# Altium footprint library BS_RFE_BB_20230506.PcbLib: 77 footprints (part 3 of 5)
Each footprint in its own frame and in the unit in brackets; x right, y up, seen from the top. Pads: shape width x height; smd on the part's side, far side on the other; paste and mask are expansions set on the pad; w line width, h text height; cw(c..) or ccw(c..) is an arc to the next point about the centre after c.
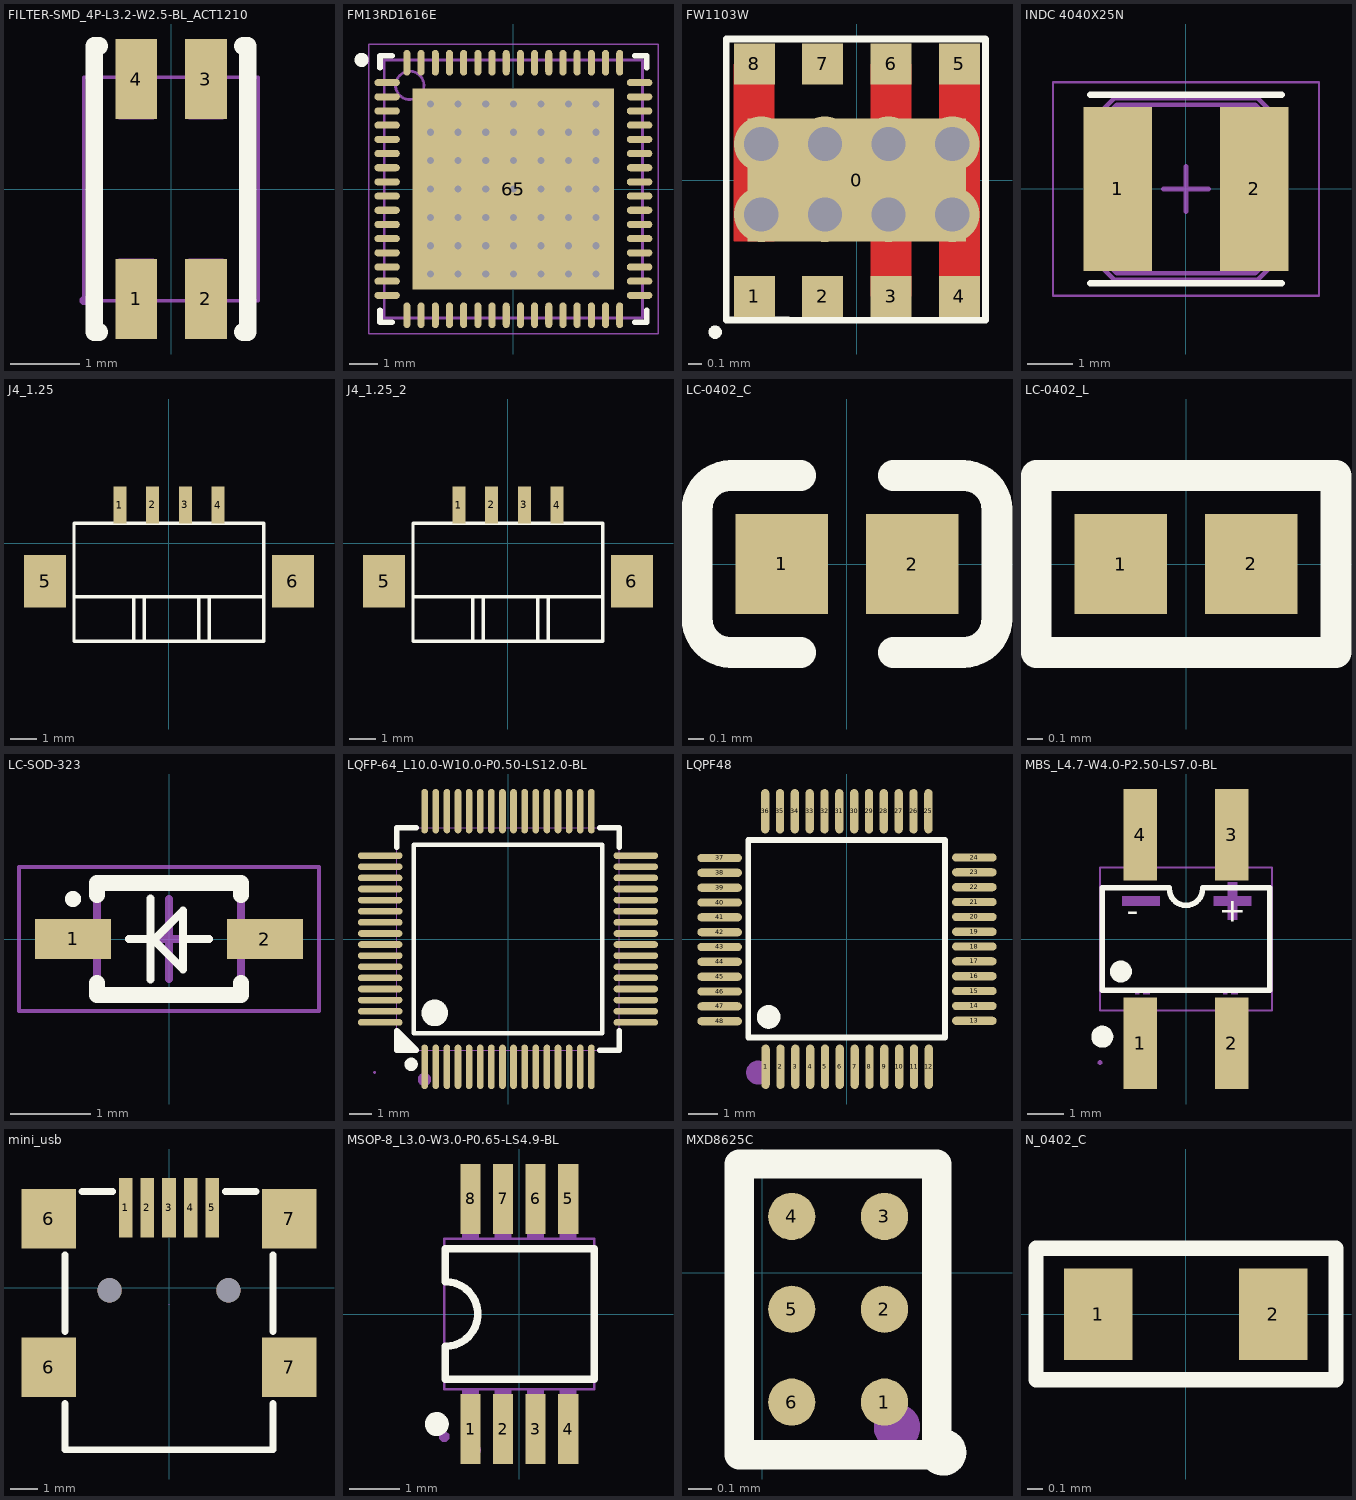
[diagram p2: the footprints below, top view; thin cyan lines are the x and y axes]

## FILTER-SMD_4P-L3.2-W2.5-BL_ACT1210 [mm]
pads (4):
  rect 0.6x1.15 smd paste+0 mask+0.051: 1(-0.5,-1.575) 2(0.5,-1.575) 3(0.5,1.575) 4(-0.5,1.575)
Top Overlay:
  lines w0.254: -1.031,-2.05 -1.1,-2.05 -1.1,2.05 -1.031,2.05 ; 1.031,-2.05 1.1,-2.05 1.1,2.05 1.031,2.05
Mechanical 15:
  region: -0.25,1 -0.75,1 -0.75,1.6 -0.25,1.6
  region: 0.75,1 0.25,1 0.25,1.6 0.75,1.6
  region: 0.75,-1.6 0.25,-1.6 0.25,-1 0.75,-1
  region: -0.25,-1.6 -0.75,-1.6 -0.75,-1 -0.25,-1
  region: -1.19,-1.6 -1.19,-1.575 -1.225,-1.54 -1.275,-1.54 -1.31,-1.575 -1.31,-1.6 -1.31,-1.625 -1.275,-1.66 -1.225,-1.66 -1.19,-1.625 -1.19,-1.6
  lines w0.051: -1.25,-1.6 -1.25,1.6 1.25,1.6 1.25,-1.6 -1.25,-1.6

## FM13RD1616E [mm]
pads (65):
  oval 0.9x0.25 smd: 1(-4.45,3.75) 2(-4.45,3.25) 3(-4.45,2.75) 4(-4.45,2.25) 5(-4.45,1.75) 6(-4.45,1.25) 7(-4.45,0.75) 8(-4.45,0.25) 9(-4.45,-0.25) 10(-4.45,-0.75) 11(-4.45,-1.25) 12(-4.45,-1.75) 13(-4.45,-2.25) 14(-4.45,-2.75) 15(-4.45,-3.25) 16(-4.45,-3.75) 33(4.45,-3.75) 34(4.45,-3.25) 35(4.45,-2.75) 36(4.45,-2.25) 37(4.45,-1.75) 38(4.45,-1.25) 39(4.45,-0.75) 40(4.45,-0.25) 41(4.45,0.25) 42(4.45,0.75) 43(4.45,1.25) 44(4.45,1.75) 45(4.45,2.25) 46(4.45,2.75) 47(4.45,3.25) 48(4.45,3.75)
  oval 0.25x0.9 smd: 17(-3.75,-4.45) 18(-3.25,-4.45) 19(-2.75,-4.45) 20(-2.25,-4.45) 21(-1.75,-4.45) 22(-1.25,-4.45) 23(-0.75,-4.45) 24(-0.25,-4.45) 25(0.25,-4.45) 26(0.75,-4.45) 27(1.25,-4.45) 28(1.75,-4.45) 29(2.25,-4.45) 30(2.75,-4.45) 31(3.25,-4.45) 32(3.75,-4.45) 49(3.75,4.45) 50(3.25,4.45) 51(2.75,4.45) 52(2.25,4.45) 53(1.75,4.45) 54(1.25,4.45) 55(0.75,4.45) 56(0.25,4.45) 57(-0.25,4.45) 58(-0.75,4.45) 59(-1.25,4.45) 60(-1.75,4.45) 61(-2.25,4.45) 62(-2.75,4.45) 63(-3.25,4.45) 64(-3.75,4.45)
  rect 7.1x7.1 smd: 65(0,0)
via 2.919,-3 diameter 0.4 hole 0.25
via 1.946,-3 diameter 0.4 hole 0.25
via -2.919,-3 diameter 0.4 hole 0.25
via -1.946,-3 diameter 0.4 hole 0.25
via -0.973,-3 diameter 0.4 hole 0.25
via 0,-3 diameter 0.4 hole 0.25
via 0.973,-3 diameter 0.4 hole 0.25
via 2.919,-2 diameter 0.4 hole 0.25
via 1.946,-2 diameter 0.4 hole 0.25
via -2.919,-2 diameter 0.4 hole 0.25
via -1.946,-2 diameter 0.4 hole 0.25
via -0.973,-2 diameter 0.4 hole 0.25
via 0,-2 diameter 0.4 hole 0.25
via 0.973,-2 diameter 0.4 hole 0.25
via 2.919,-1 diameter 0.4 hole 0.25
via 1.946,-1 diameter 0.4 hole 0.25
via -2.919,-1 diameter 0.4 hole 0.25
via -1.946,-1 diameter 0.4 hole 0.25
via -0.973,-1 diameter 0.4 hole 0.25
via 0,-1 diameter 0.4 hole 0.25
via 0.973,-1 diameter 0.4 hole 0.25
via 2.919,0 diameter 0.4 hole 0.25
via 1.946,0 diameter 0.4 hole 0.25
via -2.919,0 diameter 0.4 hole 0.25
via -1.946,0 diameter 0.4 hole 0.25
via -0.973,0 diameter 0.4 hole 0.25
via 0,0 diameter 0.4 hole 0.25
via 0.973,0 diameter 0.4 hole 0.25
via 2.919,1 diameter 0.4 hole 0.25
via 1.946,1 diameter 0.4 hole 0.25
via -2.919,1 diameter 0.4 hole 0.25
via -1.946,1 diameter 0.4 hole 0.25
via -0.973,1 diameter 0.4 hole 0.25
via 0,1 diameter 0.4 hole 0.25
via 0.973,1 diameter 0.4 hole 0.25
via 2.919,2 diameter 0.4 hole 0.25
via 1.946,2 diameter 0.4 hole 0.25
via -2.919,2 diameter 0.4 hole 0.25
via -1.946,2 diameter 0.4 hole 0.25
via -0.973,2 diameter 0.4 hole 0.25
via 0,2 diameter 0.4 hole 0.25
via 0.973,2 diameter 0.4 hole 0.25
via 2.919,3 diameter 0.4 hole 0.25
via 1.946,3 diameter 0.4 hole 0.25
via -2.919,3 diameter 0.4 hole 0.25
via -1.946,3 diameter 0.4 hole 0.25
via -0.973,3 diameter 0.4 hole 0.25
via 0,3 diameter 0.4 hole 0.25
via 0.973,3 diameter 0.4 hole 0.25
Top Overlay:
  circle w0.25: c-5.35,4.55 r0.125
  lines w0.2: -4.7,-4.275 -4.7,-4.7 -4.275,-4.7 ; -4.7,4.275 -4.7,4.7 -4.275,4.7 ; 4.275,-4.7 4.7,-4.7 4.7,-4.275 ; 4.275,4.7 4.7,4.7 4.7,4.275
Mechanical 13:
  circle w0.1: c-3.65,3.65 r0.5
  lines w0.1: -4.55,-4.55 -4.55,4.55 4.55,4.55 4.55,-4.55 -4.55,-4.55
Mechanical 15:
  lines w0.05: -5.1,-5.1 -5.1,5.1 5.1,5.1 5.1,-5.1 -5.1,-5.1
  lines w0.1: -0.5,0 0.5,0 ; 0,-0.5 0,0.5
3D body "QFN50P900X900X80_HS-65N.step": height 0.8, standoff 0, extent -4.551,-4.551 4.551,4.551

## FW1103W [mm]
pads (10):
  rect 1.6x0.9 smd mask+0: 0(0,0)
  rect 0.3x0.3 smd mask+0: 1(-0.75,-0.85) 2(-0.25,-0.85) 3(0.25,-0.85) 4(0.75,-0.85) 5(0.75,0.85) 6(0.25,0.85) 7(-0.25,0.85) 8(-0.75,0.85)
  round 0.1 on Top Overlay mask+0: ""(-1.036,-1.113)
via 0.232,-0.252 diameter 0.4 hole 0.25
via -0.699,-0.252 diameter 0.4 hole 0.25
via 0.698,-0.252 diameter 0.4 hole 0.25
via -0.233,-0.252 diameter 0.4 hole 0.25
via 0.232,0.264 diameter 0.4 hole 0.25
via -0.699,0.264 diameter 0.4 hole 0.25
via 0.698,0.264 diameter 0.4 hole 0.25
via -0.233,0.264 diameter 0.4 hole 0.25
Top Layer:
  rectangle: 0.1,-0.85 0.4,0.85
  rectangle: 0.6,-0.85 0.9,0.85
  rectangle: -0.901,-0.45 -0.601,0.85
  rectangle: 0.615,-0.451 0.898,0.451
  rectangle: -0.901,-0.45 -0.618,0.45
Top Overlay:
  lines w0.05: -0.533,-1.025 0.943,-1.025 0.943,1.032 -0.955,1.032 -0.955,-1.024 -0.5,-1.024
Top Paste:
  rectangle: -0.903,-0.451 -0.62,0.449
  rectangle: 0.618,-0.449 0.901,0.451

## INDC 4040X25N [mm]
pads (2):
  rect 1.5x3.6 smd: 1(-1.5,0) 2(1.5,0)
Top Overlay:
  lines w0.15: -2.1,-2.075 2.1,-2.075 ; -2.1,2.075 2.1,2.075
Mechanical 7:
  lines w0.1: -2,-1.575 -2,1.575 -1.575,2 1.575,2 2,1.575 2,-1.575 1.575,-2 -1.575,-2 -2,-1.575 ; -1.85,-1.525 -1.525,-1.85 1.525,-1.85 1.85,-1.525 1.85,1.525 1.525,1.85 -1.525,1.85 -1.85,1.525 -1.85,-1.525
Mechanical 15:
  lines w0.05: -2.925,-2.35 -2.925,2.35 2.925,2.35 2.925,-2.35 -2.925,-2.35
  lines w0.1: -0.5,0 0.5,0 ; 0,-0.5 0,0.5
3D body "SRN4026 Series.stp": height 2.1, standoff -0.05, extent -1.951,-1.956 1.951,1.955

## J4_1.25 [mm]
pads (6):
  rect 0.5x1.4 smd: 1(-1.875,1.45) 2(-0.625,1.45) 3(0.625,1.45) 4(1.875,1.45)
  rect 1.6x2 smd: 5(-4.72,-1.45) 6(4.72,-1.45)
Top Overlay:
  lines w0.127: -3.62,-2.05 3.614,-2.05 ; -1.34,-3.736 -1.34,-2.136 ; -0.94,-3.736 -0.94,-2.136 ; 1.14,-3.736 1.14,-2.136 ; 1.54,-3.736 1.54,-2.136 ; -3.62,-3.75 3.614,-3.75 3.614,0.75 -3.62,0.75 -3.62,-3.75

## J4_1.25_2 [mm]
pads (6):
  rect 0.5x1.4 smd: 1(-1.875,1.45) 2(-0.625,1.45) 3(0.625,1.45) 4(1.875,1.45)
  rect 1.6x2 smd: 5(-4.72,-1.45) 6(4.72,-1.45)
Top Overlay:
  lines w0.127: -3.62,-2.05 3.614,-2.05 ; -1.34,-3.736 -1.34,-2.136 ; -0.94,-3.736 -0.94,-2.136 ; 1.14,-3.736 1.14,-2.136 ; 1.54,-3.736 1.54,-2.136 ; -3.62,-3.75 3.614,-3.75 3.614,0.75 -3.62,0.75 -3.62,-3.75

## LC-0402_C [mm]
pads (2):
  rect 0.6x0.65 smd mask+0.051: 1(-0.425,0) 2(0.425,0)
Top Overlay:
  lines w0.2: -0.755,-0.575 cw(c-0.755,-0.355) -0.975,-0.355 -0.975,0.355 cw(c-0.755,0.355) -0.755,0.575 ; -0.75,-0.575 -0.3,-0.575 ; -0.75,0.575 -0.3,0.575 ; 0.3,-0.575 0.75,-0.575 ; 0.3,0.575 0.75,0.575 ; 0.755,-0.575 ccw(c0.755,-0.355) 0.975,-0.355 0.975,0.355 ccw(c0.755,0.355) 0.755,0.575
3D body "0402 SMD Capacitor.step": height 0.2, standoff 0, extent -0.483,-0.3 0.518,0.3

## LC-0402_L [mm]
pads (2):
  rect 0.6x0.65 smd mask+0.051: 1(-0.425,0) 2(0.425,0)
Top Overlay:
  lines w0.2: 0.965,-0.575 -0.975,-0.575 -0.975,0.575 0.965,0.575 ; 0.975,-0.575 0.975,0.575
3D body "User Library-RES_1005-0402.STEP": height 0.41, standoff 0, extent -0.575,-0.275 0.575,0.275

## LC-SOD-323 [mm]
pads (2):
  rect 0.95x0.5 smd: 1(-1.2,0) 2(1.2,0)
Top Overlay:
  circle w0.1: c-1.2,0.5 r0.05
  lines w0.1: -0.5,0 -0.178,0 ; -0.229,-0.508 -0.229,0.508 ; 0.178,0 0.5,0 ; -0.178,0 -0.178,-0.025 0.178,-0.381 0.178,0.356 -0.178,0
  lines w0.2: -0.9,-0.55 -0.9,-0.7 0.9,-0.7 0.9,-0.55 ; -0.9,0.55 -0.9,0.7 0.9,0.7 0.9,0.55
Mechanical 13:
  lines w0.1: -0.9,-0.7 -0.9,0.7 0.9,0.7 0.9,-0.7 -0.9,-0.7
Mechanical 15:
  lines w0.05: -1.875,-0.9 -1.875,0.9 1.875,0.9 1.875,-0.9 -1.875,-0.9
  lines w0.1: -0.5,0 0.5,0 ; 0,-0.5 0,0.5
3D body "User Library-SOD323-1.STEP": height 1.1, standoff 0, extent -1.3,-0.675 1.3,0.675

## LQFP-64_L10.0-W10.0-P0.50-LS12.0-BL [mm]
pads (64):
  oval 0.3x2 smd paste+0 mask+0.051: 1(-3.75,-5.75) 2(-3.25,-5.75) 3(-2.75,-5.75) 4(-2.25,-5.75) 5(-1.75,-5.75) 6(-1.25,-5.75) 7(-0.75,-5.75) 8(-0.25,-5.75) 9(0.25,-5.75) 10(0.75,-5.75) 11(1.25,-5.75) 12(1.75,-5.75) 13(2.25,-5.75) 14(2.75,-5.75) 15(3.25,-5.75) 16(3.75,-5.75) 33(3.75,5.75) 34(3.25,5.75) 35(2.75,5.75) 36(2.25,5.75) 37(1.75,5.75) 38(1.25,5.75) 39(0.75,5.75) 40(0.25,5.75) 41(-0.25,5.75) 42(-0.75,5.75) 43(-1.25,5.75) 44(-1.75,5.75) 45(-2.25,5.75) 46(-2.75,5.75) 47(-3.25,5.75) 48(-3.75,5.75)
  oval 2x0.3 smd paste+0 mask+0.051: 17(5.75,-3.75) 18(5.75,-3.25) 19(5.75,-2.75) 20(5.75,-2.25) 21(5.75,-1.75) 22(5.75,-1.25) 23(5.75,-0.75) 24(5.75,-0.25) 25(5.75,0.25) 26(5.75,0.75) 27(5.75,1.25) 28(5.75,1.75) 29(5.75,2.25) 30(5.75,2.75) 31(5.75,3.25) 32(5.75,3.75) 49(-5.75,3.75) 50(-5.75,3.25) 51(-5.75,2.75) 52(-5.75,2.25) 53(-5.75,1.75) 54(-5.75,1.25) 55(-5.75,0.75) 56(-5.75,0.25) 57(-5.75,-0.25) 58(-5.75,-0.75) 59(-5.75,-1.25) 60(-5.75,-1.75) 61(-5.75,-2.25) 62(-5.75,-2.75) 63(-5.75,-3.25) 64(-5.75,-3.75)
Top Overlay:
  region: -4.131,-5 -5,-4.131 -5,-5
  lines w0.2: -4.25,-4.25 -4.25,4.25 4.25,4.25 4.25,-4.25 -4.25,-4.25
  lines w0.254: -5,4.131 -5,5 -4.131,5 ; 4.131,-5 5,-5 5,-4.131 ; 4.131,5 5,5 5,4.131 ; -5,-4.131 -5,-4.131 ; -5,-4.131 -4.131,-5 -5,-5 -5,-4.131
  lines w0.3: -4.361,-5.49 ccw(c-4.36,-5.64) -4.359,-5.49
  lines w0.6: -3.299,-3.025 ccw(c-3.297,-3.325) -3.294,-3.025
Mechanical 6:
  circle w0.3: c-3.76,-6.32 r0.15
Mechanical 15:
  drawing of 133 lines, arcs and shapes, not listed

## LQPF48 [mm]
pads (48):
  oval 0.28x1.5 smd: 1(-2.743,-4.305) 2(-2.243,-4.305) 3(-1.742,-4.305) 4(-1.242,-4.305) 5(-0.742,-4.305) 6(-0.241,-4.305) 7(0.257,-4.305) 8(0.757,-4.305) 9(1.257,-4.305) 10(1.758,-4.305) 11(2.258,-4.305) 12(2.758,-4.305) 25(2.743,4.305) 26(2.243,4.305) 27(1.742,4.305) 28(1.242,4.305) 29(0.742,4.305) 30(0.241,4.305) 31(-0.257,4.305) 32(-0.757,4.305) 33(-1.257,4.305) 34(-1.758,4.305) 35(-2.258,4.305) 36(-2.758,4.305)
  oval 1.5x0.28 smd: 13(4.293,-2.756) 14(4.293,-2.256) 15(4.293,-1.755) 16(4.293,-1.255) 17(4.293,-0.754) 18(4.293,-0.254) 19(4.293,0.244) 20(4.293,0.744) 21(4.293,1.245) 22(4.293,1.745) 23(4.293,2.245) 24(4.293,2.746) 37(-4.293,2.731) 38(-4.293,2.23) 39(-4.293,1.73) 40(-4.293,1.229) 41(-4.293,0.729) 42(-4.293,0.229) 43(-4.293,-0.269) 44(-4.293,-0.77) 45(-4.293,-1.27) 46(-4.293,-1.77) 47(-4.293,-2.271) 48(-4.293,-2.771)
Top Overlay:
  lines w0.2: -2.896,3.34 3.302,3.34 3.302,-3.315 -3.327,-3.315 -3.327,3.34 -2.565,3.34
  lines w0.4: -2.642,-2.426 ccw(c-2.64,-2.626) -2.639,-2.426
Mechanical 15:
  circle w0.4: c-3,-4.5 r0.2

## MBS_L4.7-W4.0-P2.50-LS7.0-BL [mm]
pads (4):
  rect 0.91x2.495 smd paste+0 mask+0.051: 1(-1.25,-2.848) 2(1.25,-2.848) 3(1.25,2.848) 4(-1.25,2.848)
Top Overlay:
  circle w0.3: c-1.778,-0.889 r0.15
  circle w0.3: c-2.286,-2.667 r0.15
  lines w0.152: -0.457,1.371 ccw(c0,1.375) 0.457,1.371 ; -0.457,1.397 -2.286,1.397 -2.286,-1.397 2.286,-1.397 2.286,1.397 0.457,1.397
  text "+" at 0.889,0.474 h0.65
  text "-" at -1.611,0.474 h0.65
Mechanical 6:
  circle w0.3: c-1.25,-3.775 r0.15
  region: -0.988,-1.361 -0.952,-1.361 -0.952,-1.433 -0.988,-1.433
  region: -1.024,-1.361 -0.988,-1.361 -0.988,-1.505 -1.024,-1.505
  region: -1.06,-1.361 -1.024,-1.361 -1.024,-1.505 -1.06,-1.505
  region: -1.096,-1.433 -1.06,-1.433 -1.06,-1.505 -1.096,-1.505
  region: -1.132,-1.397 -1.096,-1.397 -1.096,-1.505 -1.132,-1.505
  region: -1.168,-1.397 -1.132,-1.397 -1.132,-1.505 -1.168,-1.505
  region: -1.204,-1.361 -1.168,-1.361 -1.168,-1.469 -1.204,-1.469
  region: -1.24,-1.361 -1.204,-1.361 -1.204,-1.469 -1.24,-1.469
  region: -1.276,-1.361 -1.24,-1.361 -1.24,-1.433 -1.276,-1.433
  region: -1.312,-1.361 -1.276,-1.361 -1.276,-1.505 -1.312,-1.505
  region: -1.348,-1.361 -1.312,-1.361 -1.312,-1.505 -1.348,-1.505
  region: -1.384,-1.397 -1.348,-1.397 -1.348,-1.505 -1.384,-1.505
  region: 1.412,-1.361 1.448,-1.361 1.448,-1.433 1.412,-1.433
  region: 1.376,-1.361 1.412,-1.361 1.412,-1.505 1.376,-1.505
  region: 1.34,-1.361 1.376,-1.361 1.376,-1.505 1.34,-1.505
  region: 1.304,-1.433 1.34,-1.433 1.34,-1.505 1.304,-1.505
  region: 1.268,-1.397 1.304,-1.397 1.304,-1.505 1.268,-1.505
  region: 1.232,-1.397 1.268,-1.397 1.268,-1.505 1.232,-1.505
  region: 1.196,-1.361 1.232,-1.361 1.232,-1.469 1.196,-1.469
  region: 1.16,-1.361 1.196,-1.361 1.196,-1.469 1.16,-1.469
  region: 1.124,-1.361 1.16,-1.361 1.16,-1.433 1.124,-1.433
  region: 1.088,-1.361 1.124,-1.361 1.124,-1.505 1.088,-1.505
  region: 1.052,-1.361 1.088,-1.361 1.088,-1.505 1.052,-1.505
  region: 1.016,-1.397 1.052,-1.397 1.052,-1.505 1.016,-1.505
  region: 1.651,0.913 0.762,0.913 0.762,1.167 1.778,1.167 1.778,0.913
  region: 1.397,1.421 1.397,0.532 1.143,0.532 1.143,1.548 1.397,1.548
  region: -0.849,0.913 -1.738,0.913 -1.738,1.167 -0.722,1.167 -0.722,0.913
Mechanical 15:
  region: -2.29,-3.375 -2.29,-3.35 -2.325,-3.315 -2.375,-3.315 -2.41,-3.35 -2.41,-3.375 -2.41,-3.4 -2.375,-3.435 -2.325,-3.435 -2.29,-3.4 -2.29,-3.375
  region: -1.575,-3.375 -1.575,-2.175 -0.925,-2.175 -0.925,-3.375
  region: -1.575,-2.185 -1.575,-1.79 -0.925,-1.79 -0.925,-2.185
  region: 0.925,-3.375 0.925,-2.175 1.575,-2.175 1.575,-3.375
  region: 0.925,-2.185 0.925,-1.79 1.575,-1.79 1.575,-2.185
  region: -1.575,3.375 -1.575,2.175 -0.925,2.175 -0.925,3.375
  region: -1.575,2.185 -1.575,1.79 -0.925,1.79 -0.925,2.185
  region: 0.925,3.375 0.925,2.175 1.575,2.175 1.575,3.375
  region: 0.925,2.185 0.925,1.79 1.575,1.79 1.575,2.185
  lines w0.051: -2.35,-1.95 -2.35,1.95 2.35,1.95 2.35,-1.95 -2.35,-1.95

## mini_usb [mm]
pads (11):
  rect 0.5x2.2 smd: 1(-1.6,2.95) 2(-0.8,2.95) 3(0,2.95) 4(0.8,2.95) 5(1.6,2.95)
  rect 2x2.2 smd: 6(-4.45,-2.95) 6(-4.45,2.55) 7(4.45,-2.95) 7(4.45,2.55)
  round 0.9 hole 0.9 unplated: ""(-2.2,-0.1) ""(2.2,-0.1)
Top Overlay:
  lines w0.254: -3.85,-4.281 -3.85,-6 3.85,-6 3.85,-4.281 ; -3.85,-1.619 -3.85,1.219 ; -3.219,3.556 -2.081,3.556 ; 2.081,3.556 3.219,3.556 ; 3.85,-1.619 3.85,1.219
Mechanical 15:
  lines w0.003: 0,-0.614 0,-0.613

## MSOP-8_L3.0-W3.0-P0.65-LS4.9-BL [mil]
pads (8):
  rect 15.98x55 smd mask+2: 1(-38.39,-90.55) 2(-12.8,-90.55) 3(12.8,-90.55) 4(38.39,-90.55) 5(38.39,90.55) 6(12.8,90.55) 7(-12.8,90.55) 8(-38.39,90.55)
Top Overlay:
  circle w9.45: c-64.96,-86.61 r4.72
  lines w5.91: -58.2,-51.18 -58.2,-25.5 ccw(c-58.2,0) -58.2,25.5 -58.2,51.18 59.05,51.18 59.05,-51.18 -58.2,-51.18
Mechanical 6:
  circle w7.87: c-38.19,-107.09 r3.94
Mechanical 15:
  region: -55.11,-96.46 -55.11,-94.83 -57.42,-92.52 -60.68,-92.52 -62.99,-94.83 -62.99,-96.46 -62.99,-98.09 -60.68,-100.4 -57.42,-100.4 -55.11,-98.09 -55.11,-96.46
  region: 6.4,-71 19.19,-71 19.19,-96.46 6.4,-96.46
  region: 6.42,-58.66 6.42,-72.44 19.17,-72.44 19.17,-58.66
  region: 31.99,-71 44.78,-71 44.78,-96.46 31.99,-96.46
  region: 32.01,-58.66 32.01,-72.44 44.77,-72.44 44.77,-58.66
  region: -19.19,-71 -6.4,-71 -6.4,-96.46 -19.19,-96.46
  region: -19.17,-58.66 -19.17,-72.44 -6.42,-72.44 -6.42,-58.66
  region: -44.78,-71 -31.99,-71 -31.99,-96.46 -44.78,-96.46
  region: -44.76,-58.66 -44.76,-72.44 -32.01,-72.44 -32.01,-58.66
  region: 19.19,71 6.4,71 6.4,96.46 19.19,96.46
  region: 19.18,58.66 19.18,72.44 6.42,72.44 6.42,58.66
  region: 44.78,71 31.99,71 31.99,96.46 44.78,96.46
  region: 44.77,58.66 44.77,72.44 32.01,72.44 32.01,58.66
  region: -6.4,71 -19.2,71 -19.2,96.46 -6.4,96.46
  region: -6.42,58.66 -6.42,72.44 -19.17,72.44 -19.17,58.66
  region: -31.99,71 -44.78,71 -44.78,96.46 -31.99,96.46
  region: -32.01,58.66 -32.01,72.44 -44.76,72.44 -44.76,58.66
  lines w2: -59.05,-59.05 59.05,-59.05 59.05,59.05 -59.05,59.05 -59.05,-59.05

## MXD8625C [mil]
pads (6):
  round 8 smd mask+3: 1(20.75,-21.93) 2(20.75,-6.18) 3(20.75,9.57) 4(5,9.57) 5(5,-6.18) 6(5,-21.93)
Top Overlay:
  circle w3.94: c30.71,-30.47 r1.97
  lines w5: -3.91,-30.83 29.65,-30.83 29.65,18.47 -3.91,18.47 -3.91,-30.83
Top Paste:
  region: 23.42,-25.28 18.07,-25.28 17.4,-24.61 17.4,-19.25 18.07,-18.58 23.43,-18.58 24.09,-19.25 24.09,-24.61
  region: 23.43,-9.53 18.07,-9.53 17.4,-8.86 17.4,-3.5 18.07,-2.83 23.43,-2.83 24.09,-3.5 24.09,-8.86
  region: 23.43,6.22 18.07,6.22 17.4,6.89 17.4,12.24 18.07,12.91 23.42,12.91 24.09,12.24 24.09,6.89
  region: 7.68,-25.28 2.32,-25.28 1.65,-24.61 1.65,-19.25 2.32,-18.58 7.68,-18.58 8.35,-19.25 8.35,-24.61
  region: 7.68,-9.53 2.32,-9.53 1.65,-8.86 1.65,-3.5 2.32,-2.83 7.68,-2.84 8.35,-3.5 8.35,-8.86
  region: 7.68,6.22 2.32,6.22 1.65,6.89 1.65,12.24 2.32,12.91 7.68,12.91 8.35,12.24 8.35,6.89
Mechanical 15:
  circle w3.94: c22.88,-26.18 r1.97

## N_0402_C [mm]
pads (2):
  rect 0.45x0.6 smd: 1(-0.575,0) 2(0.575,0)
Top Overlay:
  lines w0.1: -0.985,-0.431 0.986,-0.431 0.986,0.433 -0.985,0.433 -0.985,-0.431
3D body "0402 SMD Capacitor.step": height 0.2, standoff 0, extent -0.483,-0.3 0.518,0.3